# Altium integrated library ERA6AEB104V.IntLib: 1 symbol
Pins are listed as number, name and electrical type; pins without a type are passive.

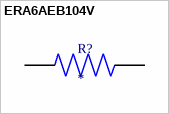
[diagram p0: symbol ERA6AEB104V]

## ERA6AEB104V
designator R?
MP: ERA6AEB104V; Price: None; Value: *; Availability: Unavailable; Package: None
footprint RES_ERA6AEB104V
pins: 1, 2